# Altium schematic symbol library PE42540F-Z.SchLib: 1 symbol
Pins are listed as number, name and electrical type; pins without a type are passive.

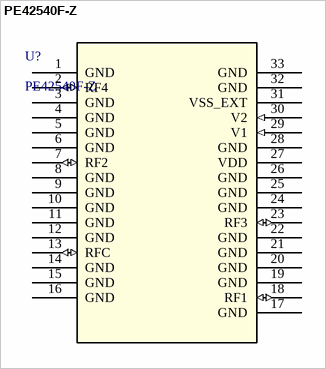
[diagram p0: symbol PE42540F-Z]

## PE42540F-Z
designator U?
Description; Manufacturer_Name: Peregine Semiconductor; Copyright: Copyright (C) 2025 Ultra Librarian. All rights reserved.; Manufacturer_Part_Number: PE42540F-Z; RefDes: RefDes; Type: Type
footprint PE42540F-Z_PSE
pins: 1 GND (power), 2 RF4 (io), 3 GND (power), 4 GND (power), 5 GND (power), 6 GND (power), 7 RF2 (io), 8 GND (power), 9 GND (power), 10 GND (power), 11 GND (power), 12 GND (power), 13 RFC (io), 14 GND (power), 15 GND (power), 16 GND (power), 17 GND (power), 18 RF1 (io), 19 GND (power), 20 GND (power), 21 GND (power), 22 GND (power), 23 RF3 (io), 24 GND (power), 25 GND (power), 26 GND (power), 27 VDD (power), 28 GND (power), 29 V1 (in), 30 V2 (in), 31 VSS_EXT (power), 32 GND (power), 33 GND (power)